# Altium schematic symbol library Schlib1.SchLib: 1 symbol
Pins are listed as number, name and electrical type; pins without a type are passive.

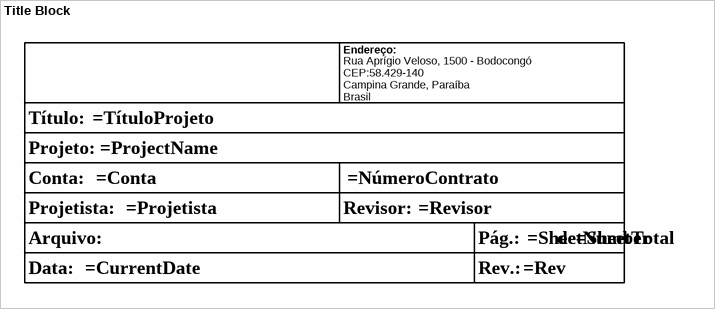
[diagram p0: symbol Title Block]

## Title Block
designator TB?  (value not drawn)  (graphical)
text: Endereço: /; Rua Aprígio Veloso, 1500 - Bodocongó / CEP:58.429-140 / Campina Grande, Paraíba / Brasil; Título:; Projeto:; Conta:; Projetista:; Revisor:; Arquivo:; Pág.:; de; Data:; Rev.: